# Altium footprint library WR-MPC3.PcbLib: 235 footprints (part 14 of 15)
Each footprint in its own frame and in the unit in brackets; x right, y up, seen from the top. Pads: shape width x height; smd on the part's side, far side on the other; paste and mask are expansions set on the pad; w line width, h text height; cw(c..) or ccw(c..) is an arc to the next point about the centre after c.
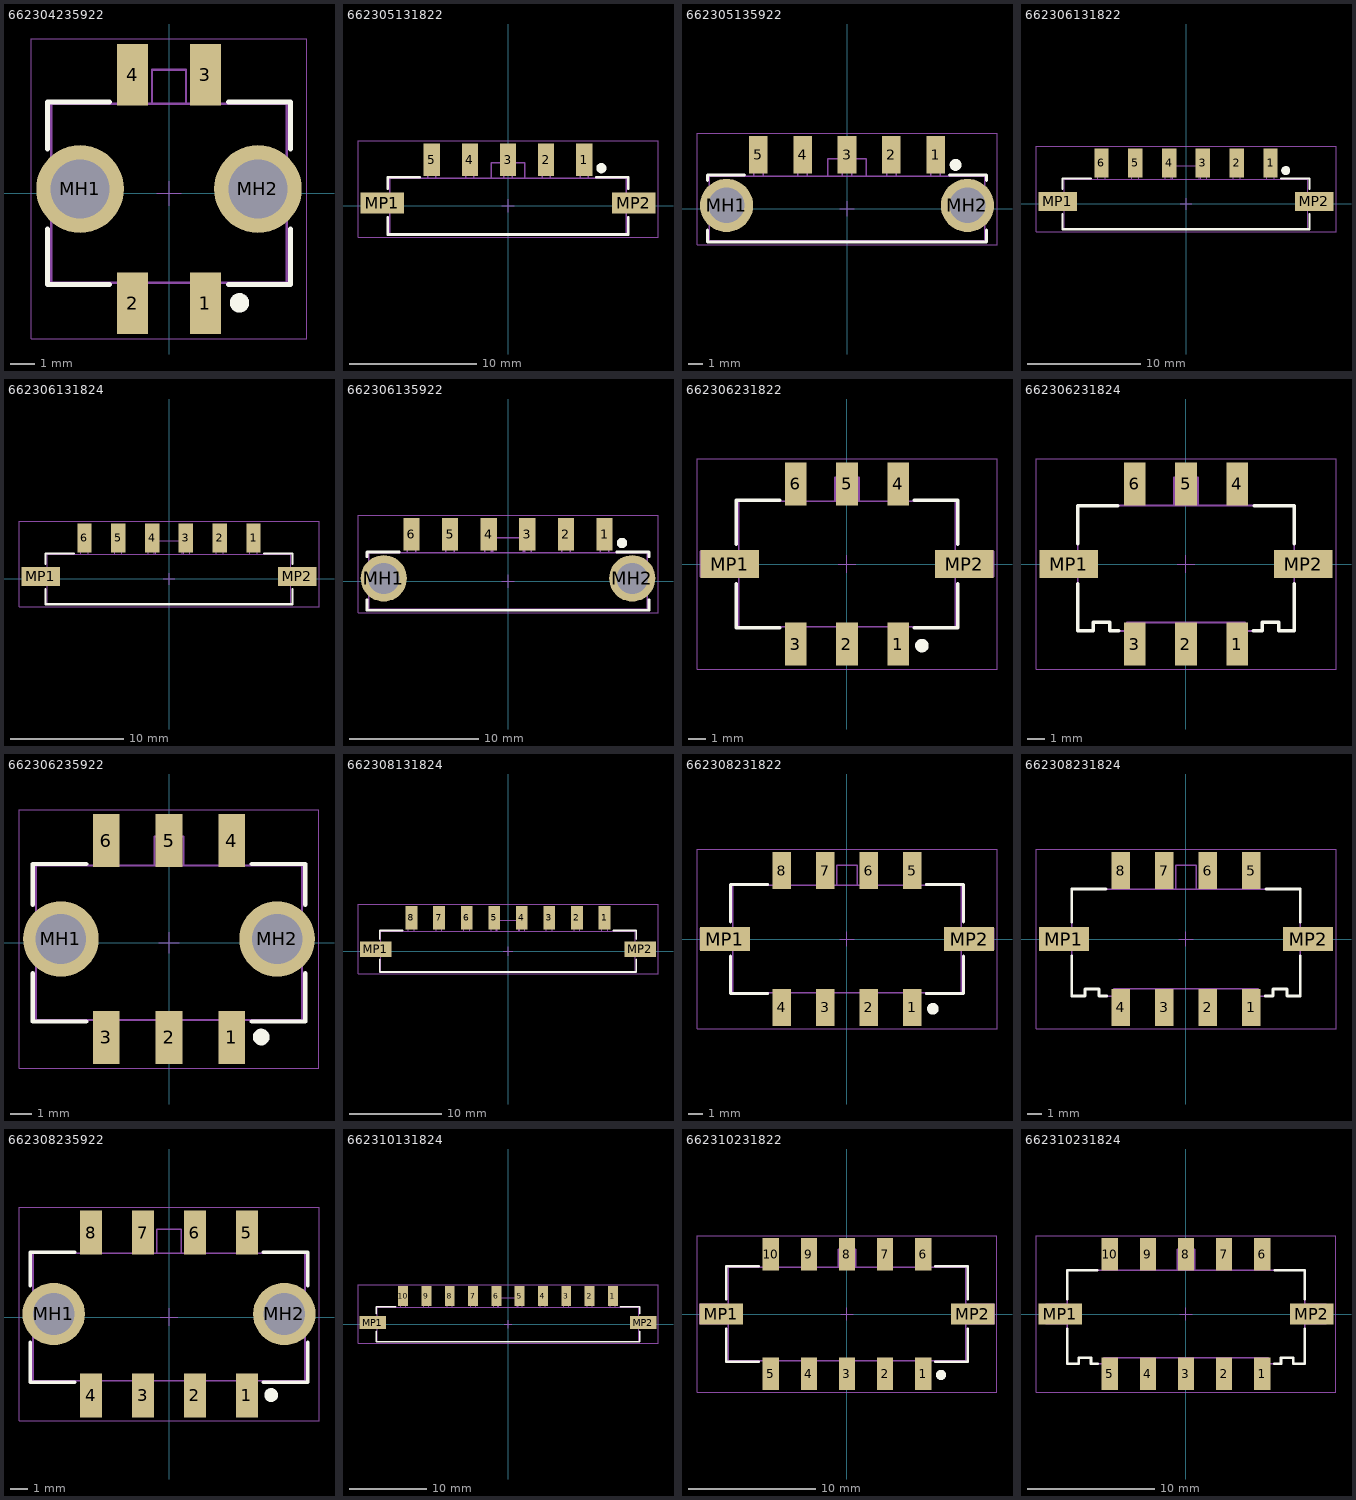
[diagram p13: the footprints below, top view; thin cyan lines are the x and y axes]

## 662304235922 [mm] "3.00mm SMT Male Dual Row Vertical Header with THT Retention Clip, 4p"
height 9.9
pads (6):
  rect 1.27x2.54 smd: 1(1.5,-4.52) 2(-1.5,-4.52) 3(1.5,4.88) 4(-1.5,4.88)
  round 3.6 hole 2.41: MH1(-3.66,0.18) MH2(3.66,0.18)
Top Overlay:
  circle w0.4: c2.9,-4.5 r0.2
  lines w0.2: -5,-1.455 -5,-3.755 -2.45,-3.755 ; -5,1.815 -5,3.755 -2.45,3.755 ; 2.45,-3.755 5,-3.755 5,-1.455 ; 2.45,3.755 5,3.755 5,1.815
Top Designator:
  text ".Designator" at -7.498,-0.5 h1.5
Top Component Outline:
  lines w0.1: -1.82,-3.68 -1.82,-5.45 -1.18,-5.45 -1.18,-3.68 ; -1.82,3.68 -1.82,5.95 -1.18,5.95 -1.18,3.68 ; -0.7,3.68 -0.7,5.08 0.7,5.08 0.7,3.68 ; 1.18,-3.68 1.18,-5.45 1.82,-5.45 1.82,-3.68 ; 1.18,3.68 1.18,5.95 1.82,5.95 1.82,3.68 ; -4.85,-3.68 4.85,-3.68 4.85,3.68 -4.85,3.68 -4.85,-3.68
Top 3D Body:
  lines w0.1: -1.82,-3.68 -1.82,-5.45 -1.18,-5.45 -1.18,-3.68 ; -1.82,3.68 -1.82,5.95 -1.18,5.95 -1.18,3.68 ; -0.7,3.68 -0.7,5.08 0.7,5.08 0.7,3.68 ; 1.18,-3.68 1.18,-5.45 1.82,-5.45 1.82,-3.68 ; 1.18,3.68 1.18,5.95 1.82,5.95 1.82,3.68 ; -4.85,-3.68 -4.85,3.68 4.85,3.68 4.85,-3.68 -4.85,-3.68
Top Courtyard:
  lines w0.05: -5.66,-5.99 5.66,-5.99 5.66,6.35 -5.66,6.35 -5.66,-5.99
Top Component Center:
  lines w0.05: -0.5,0 0.5,0 ; 0,-0.5 0,0.5
3D body "662304235922.stp": height 11.42, standoff -3.08, extent -4.85,-5.45 4.85,5.95

## 662305131822 [mm] "3.00mm SMT Male Single Vertical Header with SMT Solder Tab, 5p"
height 9.9
pads (7):
  rect 1.27x2.54 smd: 1(6,3.635) 2(3,3.635) 3(0,3.635) 4(-3,3.635) 5(-6,3.635)
  rect 3.43x1.65 smd: MP1(-9.895,0.215) MP2(9.895,0.215)
Top Overlay:
  circle w0.4: c7.35,2.96 r0.2
  lines w0.2: -9.45,-0.91 -9.45,-2.26 9.45,-2.26 9.45,-0.91 ; -9.45,1.34 -9.45,2.26 -6.95,2.26 ; 6.95,2.26 9.45,2.26 9.45,1.34
Top Designator:
  text ".Designator" at -7.498,-0.5 h1.5
Top Component Outline:
  lines w0.1: -9.325,-0.42 -11.325,-0.42 -11.325,0.85 -9.325,0.85 ; -6.32,2.185 -6.32,4.315 -5.68,4.315 -5.68,2.185 ; -3.32,2.185 -3.32,4.315 -2.68,4.315 -2.68,2.185 ; -1.3,2.185 -1.3,3.385 1.3,3.385 1.3,2.185 ; -0.32,2.185 -0.32,4.315 0.32,4.315 0.32,2.185 ; 2.68,2.185 2.68,4.315 3.32,4.315 3.32,2.185 ; 5.68,2.185 5.68,4.315 6.32,4.315 6.32,2.185 ; 9.325,-0.42 11.325,-0.42 11.325,0.85 9.325,0.85 ; -9.325,-2.185 9.325,-2.185 9.325,2.185 -9.325,2.185 -9.325,-2.185
Top 3D Body:
  lines w0.1: -9.325,-0.42 -11.325,-0.42 -11.325,0.85 -9.325,0.85 ; -6.32,2.185 -6.32,4.315 -5.68,4.315 -5.68,2.185 ; -3.32,2.185 -3.32,4.315 -2.68,4.315 -2.68,2.185 ; -1.3,2.185 -1.3,3.385 1.3,3.385 1.3,2.185 ; -0.32,2.185 -0.32,4.315 0.32,4.315 0.32,2.185 ; 2.68,2.185 2.68,4.315 3.32,4.315 3.32,2.185 ; 5.68,2.185 5.68,4.315 6.32,4.315 6.32,2.185 ; 9.325,-0.42 11.325,-0.42 11.325,0.85 9.325,0.85 ; -9.325,-2.185 9.325,-2.185 9.325,2.185 -9.325,2.185 -9.325,-2.185
Top Courtyard:
  lines w0.05: -11.81,-2.46 11.81,-2.46 11.81,5.105 -11.81,5.105 -11.81,-2.46
Top Component Center:
  lines w0.05: -0.5,0 0.5,0 ; 0,-0.5 0,0.5
3D body "662305131822.stp": height 10.14, standoff -0.01, extent -11.325,-2.25 11.325,4.315

## 662305135922 [mm] "3.00mm SMT Male Single Row Vertical Header with THT Retention Clip, 5p"
height 9.9
pads (7):
  rect 1.27x2.54 smd: 1(6,3.645) 2(3,3.645) 3(0,3.645) 4(-3,3.645) 5(-6,3.645)
  round 3.6 hole 2.41: MH1(-8.15,0.215) MH2(8.15,0.215)
Top Overlay:
  circle w0.4: c7.35,2.96 r0.2
  lines w0.2: -9.45,-1.46 -9.45,-2.26 9.45,-2.26 9.45,-1.46 ; -9.45,1.89 -9.45,2.26 -6.95,2.26 ; 6.95,2.26 9.45,2.26 9.45,1.89
Top Designator:
  text ".Designator" at -7.498,-0.5 h1.5
Top Component Outline:
  lines w0.1: -6.32,2.185 -6.32,4.445 -5.68,4.445 -5.68,2.185 ; -3.32,2.185 -3.32,4.445 -2.68,4.445 -2.68,2.185 ; -1.3,2.185 -1.3,3.385 1.3,3.385 1.3,2.185 ; -0.32,2.185 -0.32,4.445 0.32,4.445 0.32,2.185 ; 2.68,2.185 2.68,4.445 3.32,4.445 3.32,2.185 ; 5.68,2.185 5.68,4.445 6.32,4.445 6.32,2.185 ; -9.325,-2.185 9.325,-2.185 9.325,2.185 -9.325,2.185 -9.325,-2.185
Top 3D Body:
  lines w0.1: -6.32,2.185 -6.32,4.445 -5.68,4.445 -5.68,2.185 ; -3.32,2.185 -3.32,4.445 -2.68,4.445 -2.68,2.185 ; -1.3,2.185 -1.3,3.385 1.3,3.385 1.3,2.185 ; -0.32,2.185 -0.32,4.445 0.32,4.445 0.32,2.185 ; 2.68,2.185 2.68,4.445 3.32,4.445 3.32,2.185 ; 5.68,2.185 5.68,4.445 6.32,4.445 6.32,2.185 ; -9.325,-2.185 -9.325,2.185 9.325,2.185 9.325,-2.185 -9.325,-2.185
Top Courtyard:
  lines w0.05: -10.15,-2.46 -10.15,5.115 10.15,5.115 10.15,-2.46 -10.15,-2.46
Top Component Center:
  lines w0.05: -0.5,0 0.5,0 ; 0,-0.5 0,0.5
3D body "662305135922.stp": height 10.14, standoff -1.9, extent -9.325,-2.25 9.325,4.445

## 662306131822 [mm] "3.00mm SMT Male Single Vertical Header with SMT Solder Tab, 6p"
height 9.9
pads (8):
  rect 1.27x2.54 smd: 1(7.5,3.635) 2(4.5,3.635) 3(1.5,3.635) 4(-1.5,3.635) 5(-4.5,3.635) 6(-7.5,3.635)
  rect 3.43x1.65 smd: MP1(-11.395,0.215) MP2(11.395,0.215)
Top Overlay:
  circle w0.4: c8.85,2.96 r0.2
  lines w0.2: -10.95,-0.91 -10.95,-2.26 10.95,-2.26 10.95,-0.91 ; -10.95,1.34 -10.95,2.26 -8.45,2.26 ; 8.45,2.26 10.95,2.26 10.95,1.34
Top Designator:
  text ".Designator" at -7.498,-0.5 h1.5
Top Component Outline:
  lines w0.1: -10.825,-0.42 -12.825,-0.42 -12.825,0.85 -10.825,0.85 ; -7.82,2.185 -7.82,4.315 -7.18,4.315 -7.18,2.185 ; -4.82,2.185 -4.82,4.315 -4.18,4.315 -4.18,2.185 ; -1.82,2.185 -1.82,4.315 -1.18,4.315 -1.18,2.185 ; -1.3,2.185 -1.3,3.385 1.3,3.385 1.3,2.185 ; 1.18,2.185 1.18,4.315 1.82,4.315 1.82,2.185 ; 4.18,2.185 4.18,4.315 4.82,4.315 4.82,2.185 ; 7.18,2.185 7.18,4.315 7.82,4.315 7.82,2.185 ; 10.825,-0.42 12.825,-0.42 12.825,0.85 10.825,0.85 ; -10.825,-2.185 10.825,-2.185 10.825,2.185 -10.825,2.185 -10.825,-2.185
Top 3D Body:
  lines w0.1: -10.825,-0.42 -12.825,-0.42 -12.825,0.85 -10.825,0.85 ; -7.82,2.185 -7.82,4.315 -7.18,4.315 -7.18,2.185 ; -4.82,2.185 -4.82,4.315 -4.18,4.315 -4.18,2.185 ; -1.82,2.185 -1.82,4.315 -1.18,4.315 -1.18,2.185 ; -1.3,2.185 -1.3,3.385 1.3,3.385 1.3,2.185 ; 1.18,2.185 1.18,4.315 1.82,4.315 1.82,2.185 ; 4.18,2.185 4.18,4.315 4.82,4.315 4.82,2.185 ; 7.18,2.185 7.18,4.315 7.82,4.315 7.82,2.185 ; 10.825,-0.42 12.825,-0.42 12.825,0.85 10.825,0.85 ; -10.825,-2.185 -10.825,2.185 10.825,2.185 10.825,-2.185 -10.825,-2.185
Top Courtyard:
  lines w0.05: -13.31,-2.46 -13.31,5.105 13.31,5.105 13.31,-2.46 -13.31,-2.46
Top Component Center:
  lines w0.05: -0.5,0 0.5,0 ; 0,-0.5 0,0.5
3D body "662306131822.stp": height 10.14, standoff -0.01, extent -12.825,-2.25 12.825,4.315

## 662306131824 [mm] "3.00mm SMT Male Single Vertical Header with SMT Solder Tab, 6p"
height 9.9
pads (8):
  rect 1.27x2.54 smd: 1(7.5,3.635) 2(4.5,3.635) 3(1.5,3.635) 4(-1.5,3.635) 5(-4.5,3.635) 6(-7.5,3.635)
  rect 3.43x1.65 smd: MP1(-11.395,0.215) MP2(11.395,0.215)
Top Overlay:
  lines w0.2: -10.95,-0.91 -10.95,-2.26 10.95,-2.26 10.95,-0.91 ; -10.95,1.34 -10.95,2.26 -8.45,2.26 ; 8.45,2.26 10.95,2.26 10.95,1.34
Top Designator:
  text ".Designator" at -7.498,-0.5 h1.5
Top Component Outline:
  lines w0.1: -10.825,-0.42 -12.825,-0.42 -12.825,0.85 -10.825,0.85 ; -7.82,2.185 -7.82,4.315 -7.18,4.315 -7.18,2.185 ; -4.82,2.185 -4.82,4.315 -4.18,4.315 -4.18,2.185 ; -1.82,2.185 -1.82,4.315 -1.18,4.315 -1.18,2.185 ; -1.3,2.185 -1.3,3.385 1.3,3.385 1.3,2.185 ; 1.18,2.185 1.18,4.315 1.82,4.315 1.82,2.185 ; 4.18,2.185 4.18,4.315 4.82,4.315 4.82,2.185 ; 7.18,2.185 7.18,4.315 7.82,4.315 7.82,2.185 ; 10.825,-0.42 12.825,-0.42 12.825,0.85 10.825,0.85 ; -10.825,-2.185 -10.825,2.185 10.825,2.185 10.825,-2.185 -10.825,-2.185
Top Courtyard:
  lines w0.05: -13.31,-2.46 13.31,-2.46 13.31,5.105 -13.31,5.105 -13.31,-2.46
Top Component Center:
  lines w0.05: -0.5,0 0.5,0 ; 0,-0.5 0,0.5
3D body "662306131824.stp": height 10.14, standoff -0.01, extent -12.825,-2.249 12.825,4.315

## 662306135922 [mm] "3.00mm SMT Male Single Row Vertical Header with THT Retention Clip, 6p"
height 9.9
pads (8):
  rect 1.27x2.54 smd: 1(7.5,3.645) 2(4.5,3.645) 3(1.5,3.645) 4(-1.5,3.645) 5(-4.5,3.645) 6(-7.5,3.645)
  round 3.6 hole 2.41: MH1(-9.65,0.215) MH2(9.65,0.215)
Top Overlay:
  circle w0.4: c8.85,2.96 r0.2
  lines w0.2: -10.95,-1.46 -10.95,-2.26 10.95,-2.26 10.95,-1.46 ; -10.95,1.89 -10.95,2.26 -8.45,2.26 ; 8.45,2.26 10.95,2.26 10.95,1.89
Top Designator:
  text ".Designator" at -7.498,-0.5 h1.5
Top Component Outline:
  lines w0.1: -7.82,2.185 -7.82,4.445 -7.18,4.445 -7.18,2.185 ; -4.82,2.185 -4.82,4.445 -4.18,4.445 -4.18,2.185 ; -1.82,2.185 -1.82,4.445 -1.18,4.445 -1.18,2.185 ; -1.3,2.185 -1.3,3.385 1.3,3.385 1.3,2.185 ; 1.18,2.185 1.18,4.445 1.82,4.445 1.82,2.185 ; 4.18,2.185 4.18,4.445 4.82,4.445 4.82,2.185 ; 7.18,2.185 7.18,4.445 7.82,4.445 7.82,2.185 ; -10.825,-2.185 10.825,-2.185 10.825,2.185 -10.825,2.185 -10.825,-2.185
Top 3D Body:
  lines w0.1: -7.82,2.185 -7.82,4.445 -7.18,4.445 -7.18,2.185 ; -4.82,2.185 -4.82,4.445 -4.18,4.445 -4.18,2.185 ; -1.82,2.185 -1.82,4.445 -1.18,4.445 -1.18,2.185 ; -1.3,2.185 -1.3,3.385 1.3,3.385 1.3,2.185 ; 1.18,2.185 1.18,4.445 1.82,4.445 1.82,2.185 ; 4.18,2.185 4.18,4.445 4.82,4.445 4.82,2.185 ; 7.18,2.185 7.18,4.445 7.82,4.445 7.82,2.185 ; -10.825,-2.185 -10.825,2.185 10.825,2.185 10.825,-2.185 -10.825,-2.185
Top Courtyard:
  lines w0.05: -11.65,-2.46 -11.65,5.115 11.65,5.115 11.65,-2.46 -11.65,-2.46
Top Component Center:
  lines w0.05: -0.5,0 0.5,0 ; 0,-0.5 0,0.5
3D body "662306135922.stp": height 10.14, standoff -1.9, extent -10.825,-2.25 10.825,4.445

## 662306231822 [mm] "3.00mm SMT Male Dual Row Vertical Header with SMT Solder Tab, 6p"
height 9.9
pads (8):
  rect 1.27x2.54 smd: 1(3,-4.7) 2(0,-4.7) 3(-3,-4.7) 4(3,4.7) 5(0,4.7) 6(-3,4.7)
  rect 3.43x1.65 smd: MP1(-6.895,0) MP2(6.895,0)
Top Overlay:
  circle w0.4: c4.4,-4.795 r0.2
  lines w0.2: -6.5,-1.155 -6.5,-3.755 -3.95,-3.755 ; -6.5,1.155 -6.5,3.755 -3.95,3.755 ; 3.95,-3.755 6.5,-3.755 6.5,-1.155 ; 3.95,3.755 6.5,3.755 6.5,1.155
Top Designator:
  text ".Designator" at -7.498,-0.5 h1.5
Top Component Outline:
  lines w0.1: -6.35,-0.75 -8.6,-0.75 -8.6,0.75 -6.35,0.75 ; -3.32,-3.68 -3.32,-5.698 -2.68,-5.698 -2.68,-3.68 ; -3.32,3.68 -3.32,5.698 -2.68,5.698 -2.68,3.68 ; -0.7,3.68 -0.7,5.08 0.7,5.08 0.7,3.68 ; -0.32,-3.68 -0.32,-5.698 0.32,-5.698 0.32,-3.68 ; -0.32,3.68 -0.32,5.698 0.32,5.698 0.32,3.68 ; 2.68,-3.68 2.68,-5.698 3.32,-5.698 3.32,-3.68 ; 2.68,3.68 2.68,5.698 3.32,5.698 3.32,3.68 ; 6.35,-0.75 8.6,-0.75 8.6,0.75 6.35,0.75 ; -6.35,-3.68 6.35,-3.68 6.35,3.68 -6.35,3.68 ; -6.35,-3.68 -6.35,3.68 ; -6.35,-3.68 -6.35,3.68
Top 3D Body:
  lines w0.1: -6.35,-0.75 -8.6,-0.75 -8.6,0.75 -6.35,0.75 ; -3.32,-3.68 -3.32,-5.698 -2.68,-5.698 -2.68,-3.68 ; -3.32,3.68 -3.32,5.698 -2.68,5.698 -2.68,3.68 ; -0.7,3.68 -0.7,5.08 0.7,5.08 0.7,3.68 ; -0.32,-3.68 -0.32,-5.698 0.32,-5.698 0.32,-3.68 ; -0.32,3.68 -0.32,5.698 0.32,5.698 0.32,3.68 ; 2.68,-3.68 2.68,-5.698 3.32,-5.698 3.32,-3.68 ; 2.68,3.68 2.68,5.698 3.32,5.698 3.32,3.68 ; 6.35,-0.75 8.6,-0.75 8.6,0.75 6.35,0.75 ; -6.35,-3.68 -6.35,3.68 ; -6.35,-3.68 6.35,-3.68 6.35,3.68 -6.35,3.68 ; -6.35,-3.68 -6.35,3.68
Top Courtyard:
  lines w0.05: -8.81,-6.17 8.81,-6.17 8.81,6.17 -8.81,6.17 -8.81,-6.17
Top Component Center:
  lines w0.05: -0.5,0 0.5,0 ; 0,-0.5 0,0.5
3D body "662306231822.stp": height 11.43, standoff 0.03, extent -8.6,-5.698 8.6,5.698

## 662306231824 [mm] "3.00mm SMT Male Dual Row Vertical Header with SMT Solder Tab, 6p"
height 9.9
pads (8):
  rect 1.27x2.54 smd: 1(3,-4.7) 2(0,-4.7) 3(-3,-4.7) 4(3,4.7) 5(0,4.7) 6(-3,4.7)
  rect 3.43x1.65 smd: MP1(-6.895,0) MP2(6.895,0)
Top Overlay:
  lines w0.2: -6.35,-1.17 -6.35,-3.93 -5.45,-3.93 -5.45,-3.43 -4.48,-3.43 -4.48,-3.93 -3.95,-3.93 ; -6.35,1.18 -6.35,3.43 -4.003,3.43 ; 3.95,-3.93 4.48,-3.93 4.48,-3.43 5.45,-3.43 5.45,-3.93 6.35,-3.93 6.35,-1.17 ; 4.003,3.43 6.35,3.43 6.35,1.18
Top Designator:
  text ".Designator" at -7.498,-0.5 h1.5
Top Component Outline:
  lines w0.1: -6.35,-0.75 -8.05,-0.75 -8.05,0.75 -6.35,0.75 ; -3.32,-3.43 -3.32,-5.698 -2.68,-5.698 -2.68,-3.43 ; -3.32,3.43 -3.32,5.698 -2.68,5.698 -2.68,3.43 ; -0.7,3.43 -0.7,5.08 0.7,5.08 0.7,3.43 ; -0.32,-3.43 -0.32,-5.698 0.32,-5.698 0.32,-3.43 ; -0.32,3.43 -0.32,5.698 0.32,5.698 0.32,3.43 ; 2.68,-3.43 2.68,-5.698 3.32,-5.698 3.32,-3.43 ; 2.68,3.43 2.68,5.698 3.32,5.698 3.32,3.43 ; 6.35,-0.75 8.05,-0.75 8.05,0.75 6.35,0.75 ; -6.35,-3.93 -5.45,-3.93 -5.45,-3.43 -4.48,-3.43 -4.48,-3.93 -3.48,-3.93 -3.48,-3.43 3.48,-3.43 3.48,-3.93 4.48,-3.93 4.48,-3.43 5.45,-3.43 5.45,-3.93 6.35,-3.93 6.35,3.43 -6.35,3.43 -6.35,-3.93
Top Courtyard:
  lines w0.05: -8.81,-6.17 -8.81,6.17 8.81,6.17 8.81,-6.17 -8.81,-6.17
Top Component Center:
  lines w0.05: -0.5,0 0.5,0 ; 0,-0.5 0,0.5
3D body "662306231824.stp": height 11.43, standoff 0.03, extent -8.045,-5.698 8.045,5.698

## 662306235922 [mm] "3.00mm SMT Male Dual Row Vertical Header with THT Retention Clip, 6p"
height 9.9
pads (8):
  rect 1.27x2.54 smd: 1(3,-4.52) 2(0,-4.52) 3(-3,-4.52) 4(3,4.88) 5(0,4.88) 6(-3,4.88)
  round 3.6 hole 2.41: MH1(-5.16,0.18) MH2(5.16,0.18)
Top Overlay:
  circle w0.4: c4.4,-4.5 r0.2
  lines w0.2: -6.5,-1.455 -6.5,-3.755 -3.95,-3.755 ; -6.5,1.815 -6.5,3.755 -3.95,3.755 ; 3.95,-3.755 6.5,-3.755 6.5,-1.455 ; 3.95,3.755 6.5,3.755 6.5,1.815
Top Designator:
  text ".Designator" at -7.498,-0.5 h1.5
Top Component Outline:
  lines w0.1: -3.32,-3.68 -3.32,-5.45 -2.68,-5.45 -2.68,-3.68 ; -3.32,3.68 -3.32,5.95 -2.68,5.95 -2.68,3.68 ; -0.7,3.68 -0.7,5.08 0.7,5.08 0.7,3.68 ; -0.32,-3.68 -0.32,-5.45 0.32,-5.45 0.32,-3.68 ; -0.32,3.68 -0.32,5.95 0.32,5.95 0.32,3.68 ; 2.68,-3.68 2.68,-5.45 3.32,-5.45 3.32,-3.68 ; 2.68,3.68 2.68,5.95 3.32,5.95 3.32,3.68 ; -6.35,-3.68 -6.35,3.68 6.35,3.68 6.35,-3.68 -6.35,-3.68
Top 3D Body:
  lines w0.1: -3.32,-3.68 -3.32,-5.45 -2.68,-5.45 -2.68,-3.68 ; -3.32,3.68 -3.32,5.95 -2.68,5.95 -2.68,3.68 ; -0.7,3.68 -0.7,5.08 0.7,5.08 0.7,3.68 ; -0.32,-3.68 -0.32,-5.45 0.32,-5.45 0.32,-3.68 ; -0.32,3.68 -0.32,5.95 0.32,5.95 0.32,3.68 ; 2.68,-3.68 2.68,-5.45 3.32,-5.45 3.32,-3.68 ; 2.68,3.68 2.68,5.95 3.32,5.95 3.32,3.68 ; -6.35,-3.68 6.35,-3.68 6.35,3.68 -6.35,3.68 -6.35,-3.68
Top Courtyard:
  lines w0.05: -7.16,-5.99 -7.16,6.35 7.16,6.35 7.16,-5.99 -7.16,-5.99
Top Component Center:
  lines w0.05: -0.5,0 0.5,0 ; 0,-0.5 0,0.5
3D body "662306235922.stp": height 11.42, standoff -3.08, extent -6.35,-5.45 6.35,5.95

## 662308131824 [mm] "3.00mm SMT Male Single Vertical Header with SMT Solder Tab, 8p"
height 9.9
pads (10):
  rect 1.27x2.54 smd: 1(10.5,3.635) 2(7.5,3.635) 3(4.5,3.635) 4(1.5,3.635) 5(-1.5,3.635) 6(-4.5,3.635) 7(-7.5,3.635) 8(-10.5,3.635)
  rect 3.43x1.65 smd: MP1(-14.395,0.215) MP2(14.395,0.215)
Top Overlay:
  lines w0.2: -13.95,-0.91 -13.95,-2.26 13.95,-2.26 13.95,-0.91 ; -13.95,1.34 -13.95,2.26 -11.45,2.26 ; 11.45,2.26 13.95,2.26 13.95,1.34
Top Designator:
  text ".Designator" at -7.498,-0.5 h1.5
Top Component Outline:
  lines w0.1: -13.825,-0.42 -15.825,-0.42 -15.825,0.85 -13.825,0.85 ; -10.82,2.185 -10.82,4.315 -10.18,4.315 -10.18,2.185 ; -7.82,2.185 -7.82,4.315 -7.18,4.315 -7.18,2.185 ; -4.82,2.185 -4.82,4.315 -4.18,4.315 -4.18,2.185 ; -1.82,2.185 -1.82,4.315 -1.18,4.315 -1.18,2.185 ; -1.3,2.185 -1.3,3.385 1.3,3.385 1.3,2.185 ; 1.18,2.185 1.18,4.315 1.82,4.315 1.82,2.185 ; 4.18,2.185 4.18,4.315 4.82,4.315 4.82,2.185 ; 7.18,2.185 7.18,4.315 7.82,4.315 7.82,2.185 ; 10.18,2.185 10.18,4.315 10.82,4.315 10.82,2.185 ; 13.825,-0.42 15.825,-0.42 15.825,0.85 13.825,0.85 ; -13.825,-2.185 13.825,-2.185 13.825,2.185 -13.825,2.185 -13.825,-2.185
Top Courtyard:
  lines w0.05: -16.31,-2.46 -16.31,5.105 16.31,5.105 16.31,-2.46 -16.31,-2.46
Top Component Center:
  lines w0.05: -0.5,0 0.5,0 ; 0,-0.5 0,0.5
3D body "662308131824.stp": height 10.14, standoff -0.01, extent -15.825,-2.185 15.825,4.379

## 662308231822 [mm] "3.00mm SMT Male Dual Row Vertical Header with SMT Solder Tab, 8p"
height 9.9
pads (10):
  rect 1.27x2.54 smd: 1(4.5,-4.7) 2(1.5,-4.7) 3(-1.5,-4.7) 4(-4.5,-4.7) 5(4.5,4.7) 6(1.5,4.7) 7(-1.5,4.7) 8(-4.5,4.7)
  rect 3.43x1.65 smd: MP1(-8.395,0) MP2(8.395,0)
Top Overlay:
  circle w0.4: c5.9,-4.795 r0.2
  lines w0.2: -8,-1.155 -8,-3.755 -5.45,-3.755 ; -8,1.155 -8,3.755 -5.45,3.755 ; 5.45,-3.755 8,-3.755 8,-1.155 ; 5.45,3.755 8,3.755 8,1.155
Top Designator:
  text ".Designator" at -7.498,-0.5 h1.5
Top Component Outline:
  lines w0.1: -7.85,-0.75 -10.1,-0.75 -10.1,0.75 -7.85,0.75 ; -4.82,-3.68 -4.82,-5.698 -4.18,-5.698 -4.18,-3.68 ; -4.82,3.68 -4.82,5.698 -4.18,5.698 -4.18,3.68 ; -1.82,-3.68 -1.82,-5.698 -1.18,-5.698 -1.18,-3.68 ; -1.82,3.68 -1.82,5.698 -1.18,5.698 -1.18,3.68 ; -0.7,3.68 -0.7,5.08 0.7,5.08 0.7,3.68 ; 1.18,-3.68 1.18,-5.698 1.82,-5.698 1.82,-3.68 ; 1.18,3.68 1.18,5.698 1.82,5.698 1.82,3.68 ; 4.18,-3.68 4.18,-5.698 4.82,-5.698 4.82,-3.68 ; 4.18,3.68 4.18,5.698 4.82,5.698 4.82,3.68 ; 7.85,-0.75 10.1,-0.75 10.1,0.75 7.85,0.75 ; -7.85,-3.68 7.85,-3.68 7.85,3.68 -7.85,3.68 -7.85,-3.68
Top 3D Body:
  lines w0.1: -7.85,-0.75 -10.1,-0.75 -10.1,0.75 -7.85,0.75 ; -4.82,-3.68 -4.82,-5.698 -4.18,-5.698 -4.18,-3.68 ; -4.82,3.68 -4.82,5.698 -4.18,5.698 -4.18,3.68 ; -1.82,-3.68 -1.82,-5.698 -1.18,-5.698 -1.18,-3.68 ; -1.82,3.68 -1.82,5.698 -1.18,5.698 -1.18,3.68 ; -0.7,3.68 -0.7,5.08 0.7,5.08 0.7,3.68 ; 1.18,-3.68 1.18,-5.698 1.82,-5.698 1.82,-3.68 ; 1.18,3.68 1.18,5.698 1.82,5.698 1.82,3.68 ; 4.18,-3.68 4.18,-5.698 4.82,-5.698 4.82,-3.68 ; 4.18,3.68 4.18,5.698 4.82,5.698 4.82,3.68 ; 7.85,-0.75 10.1,-0.75 10.1,0.75 7.85,0.75 ; -7.85,-3.68 -7.85,3.68 7.85,3.68 7.85,-3.68 -7.85,-3.68
Top Courtyard:
  lines w0.05: -10.31,-6.17 -10.31,6.17 10.31,6.17 10.31,-6.17 -10.31,-6.17
Top Component Center:
  lines w0.05: -0.5,0 0.5,0 ; 0,-0.5 0,0.5
3D body "662308231822.stp": height 11.43, standoff 0.03, extent -10.1,-5.698 10.1,5.698

## 662308231824 [mm] "3.00mm SMT Male Dual Row Vertical Header with SMT Solder Tab, 8p"
height 9.9
pads (10):
  rect 1.27x2.54 smd: 1(4.5,-4.7) 2(1.5,-4.7) 3(-1.5,-4.7) 4(-4.5,-4.7) 5(4.5,4.7) 6(1.5,4.7) 7(-1.5,4.7) 8(-4.5,4.7)
  rect 3.43x1.65 smd: MP1(-8.395,0) MP2(8.395,0)
Top Overlay:
  lines w0.2: -7.85,-1.17 -7.85,-3.93 -6.95,-3.93 -6.95,-3.43 -5.98,-3.43 -5.98,-3.93 -5.45,-3.93 ; -7.85,1.18 -7.85,3.43 -5.503,3.43 ; 5.45,-3.93 5.98,-3.93 5.98,-3.43 6.95,-3.43 6.95,-3.93 7.85,-3.93 7.85,-1.17 ; 5.503,3.43 7.85,3.43 7.85,1.18
Top Designator:
  text ".Designator" at -7.498,-0.5 h1.5
Top Component Outline:
  lines w0.1: -7.85,-0.75 -9.55,-0.75 -9.55,0.75 -7.85,0.75 ; -4.82,-3.43 -4.82,-5.698 -4.18,-5.698 -4.18,-3.43 ; -4.82,3.43 -4.82,5.698 -4.18,5.698 -4.18,3.43 ; -1.82,-3.43 -1.82,-5.698 -1.18,-5.698 -1.18,-3.43 ; -1.82,3.43 -1.82,5.698 -1.18,5.698 -1.18,3.43 ; -0.7,3.43 -0.7,5.08 0.7,5.08 0.7,3.43 ; 1.18,-3.43 1.18,-5.698 1.82,-5.698 1.82,-3.43 ; 1.18,3.43 1.18,5.698 1.82,5.698 1.82,3.43 ; 4.18,-3.43 4.18,-5.698 4.82,-5.698 4.82,-3.43 ; 4.18,3.43 4.18,5.698 4.82,5.698 4.82,3.43 ; 7.85,-0.75 9.55,-0.75 9.55,0.75 7.85,0.75 ; -7.85,-3.93 -6.95,-3.93 -6.95,-3.43 -5.98,-3.43 -5.98,-3.93 -4.98,-3.93 -4.98,-3.43 4.98,-3.43 4.98,-3.93 5.98,-3.93 5.98,-3.43 6.95,-3.43 6.95,-3.93 7.85,-3.93 7.85,3.43 -7.85,3.43 -7.85,-3.93
Top Courtyard:
  lines w0.05: -10.31,-6.17 -10.31,6.17 10.31,6.17 10.31,-6.17 -10.31,-6.17
Top Component Center:
  lines w0.05: -0.5,0 0.5,0 ; 0,-0.5 0,0.5
3D body "662308231824.stp": height 11.43, standoff 0.03, extent -9.545,-5.698 9.545,5.698

## 662308235922 [mm] "3.00mm SMT Male Dual Row Vertical Header with THT Retention Clip, 8p"
height 9.9
pads (10):
  rect 1.27x2.54 smd: 1(4.5,-4.52) 2(1.5,-4.52) 3(-1.5,-4.52) 4(-4.5,-4.52) 5(4.5,4.88) 6(1.5,4.88) 7(-1.5,4.88) 8(-4.5,4.88)
  round 3.6 hole 2.41: MH1(-6.66,0.18) MH2(6.66,0.18)
Top Overlay:
  circle w0.4: c5.9,-4.5 r0.2
  lines w0.2: -8,-1.455 -8,-3.755 -5.45,-3.755 ; -8,1.815 -8,3.755 -5.45,3.755 ; 5.45,-3.755 8,-3.755 8,-1.455 ; 5.45,3.755 8,3.755 8,1.815
Top Designator:
  text ".Designator" at -7.498,-0.5 h1.5
Top Component Outline:
  lines w0.1: -4.82,-3.68 -4.82,-5.45 -4.18,-5.45 -4.18,-3.68 ; -4.82,3.68 -4.82,5.95 -4.18,5.95 -4.18,3.68 ; -1.82,-3.68 -1.82,-5.45 -1.18,-5.45 -1.18,-3.68 ; -1.82,3.68 -1.82,5.95 -1.18,5.95 -1.18,3.68 ; -0.7,3.68 -0.7,5.08 0.7,5.08 0.7,3.68 ; 1.18,-3.68 1.18,-5.45 1.82,-5.45 1.82,-3.68 ; 1.18,3.68 1.18,5.95 1.82,5.95 1.82,3.68 ; 4.18,-3.68 4.18,-5.45 4.82,-5.45 4.82,-3.68 ; 4.18,3.68 4.18,5.95 4.82,5.95 4.82,3.68 ; -7.85,-3.68 7.85,-3.68 7.85,3.68 -7.85,3.68 -7.85,-3.68
Top 3D Body:
  lines w0.1: -4.82,-3.68 -4.82,-5.45 -4.18,-5.45 -4.18,-3.68 ; -4.82,3.68 -4.82,5.95 -4.18,5.95 -4.18,3.68 ; -1.82,-3.68 -1.82,-5.45 -1.18,-5.45 -1.18,-3.68 ; -1.82,3.68 -1.82,5.95 -1.18,5.95 -1.18,3.68 ; -0.7,3.68 -0.7,5.08 0.7,5.08 0.7,3.68 ; 1.18,-3.68 1.18,-5.45 1.82,-5.45 1.82,-3.68 ; 1.18,3.68 1.18,5.95 1.82,5.95 1.82,3.68 ; 4.18,-3.68 4.18,-5.45 4.82,-5.45 4.82,-3.68 ; 4.18,3.68 4.18,5.95 4.82,5.95 4.82,3.68 ; -7.85,-3.68 7.85,-3.68 7.85,3.68 -7.85,3.68 -7.85,-3.68
Top Courtyard:
  lines w0.05: -8.66,-5.99 -8.66,6.35 8.66,6.35 8.66,-5.99 -8.66,-5.99
Top Component Center:
  lines w0.05: -0.5,0 0.5,0 ; 0,-0.5 0,0.5
3D body "662308235922.stp": height 11.42, standoff -3.08, extent -7.85,-5.45 7.85,5.95

## 662310131824 [mm] "3.00mm SMT Male Single Vertical Header with SMT Solder Tab, 10p"
height 9.9
pads (12):
  rect 1.27x2.54 smd: 1(13.5,3.635) 2(10.5,3.635) 3(7.5,3.635) 4(4.5,3.635) 5(1.5,3.635) 6(-1.5,3.635) 7(-4.5,3.635) 8(-7.5,3.635) 9(-10.5,3.635) 10(-13.5,3.635)
  rect 3.43x1.65 smd: MP1(-17.395,0.215) MP2(17.395,0.215)
Top Overlay:
  lines w0.2: -16.95,-0.91 -16.95,-2.26 16.95,-2.26 16.95,-0.91 ; -16.95,1.34 -16.95,2.26 -14.45,2.26 ; 14.45,2.26 16.95,2.26 16.95,1.34
Top Designator:
  text ".Designator" at -7.498,-0.5 h1.5
Top Component Outline:
  lines w0.1: -16.825,-0.42 -18.825,-0.42 -18.825,0.85 -16.825,0.85 ; -13.82,2.185 -13.82,4.315 -13.18,4.315 -13.18,2.185 ; -10.82,2.185 -10.82,4.315 -10.18,4.315 -10.18,2.185 ; -7.82,2.185 -7.82,4.315 -7.18,4.315 -7.18,2.185 ; -4.82,2.185 -4.82,4.315 -4.18,4.315 -4.18,2.185 ; -1.82,2.185 -1.82,4.315 -1.18,4.315 -1.18,2.185 ; -1.3,2.185 -1.3,3.385 1.3,3.385 1.3,2.185 ; 1.18,2.185 1.18,4.315 1.82,4.315 1.82,2.185 ; 4.18,2.185 4.18,4.315 4.82,4.315 4.82,2.185 ; 7.18,2.185 7.18,4.315 7.82,4.315 7.82,2.185 ; 10.18,2.185 10.18,4.315 10.82,4.315 10.82,2.185 ; 13.18,2.185 13.18,4.315 13.82,4.315 13.82,2.185 ; 16.825,-0.42 18.825,-0.42 18.825,0.85 16.825,0.85 ; -16.825,-2.185 16.825,-2.185 16.825,2.185 -16.825,2.185 -16.825,-2.185
Top Courtyard:
  lines w0.05: -19.31,-2.46 -19.31,5.105 19.31,5.105 19.31,-2.46 -19.31,-2.46
Top Component Center:
  lines w0.05: -0.5,0 0.5,0 ; 0,-0.5 0,0.5
3D body "662310131824.stp": height 10.14, standoff -0.01, extent -18.825,-2.185 18.825,4.379

## 662310231822 [mm] "3.00mm SMT Male Dual Row Vertical Header with SMT Solder Tab, 10p"
height 9.9
pads (12):
  rect 1.27x2.54 smd: 1(6,-4.7) 2(3,-4.7) 3(0,-4.7) 4(-3,-4.7) 5(-6,-4.7) 6(6,4.7) 7(3,4.7) 8(0,4.7) 9(-3,4.7) 10(-6,4.7)
  rect 3.43x1.65 smd: MP1(-9.895,0) MP2(9.895,0)
Top Overlay:
  circle w0.4: c7.4,-4.795 r0.2
  lines w0.2: -9.5,-1.155 -9.5,-3.755 -6.95,-3.755 ; -9.5,1.155 -9.5,3.755 -6.95,3.755 ; 6.95,-3.755 9.5,-3.755 9.5,-1.155 ; 6.95,3.755 9.5,3.755 9.5,1.155
Top Designator:
  text ".Designator" at -7.498,-0.5 h1.5
Top Component Outline:
  lines w0.1: -9.35,-0.75 -11.6,-0.75 -11.6,0.75 -9.35,0.75 ; -6.32,-3.68 -6.32,-5.698 -5.68,-5.698 -5.68,-3.68 ; -6.32,3.68 -6.32,5.698 -5.68,5.698 -5.68,3.68 ; -3.32,-3.68 -3.32,-5.698 -2.68,-5.698 -2.68,-3.68 ; -3.32,3.68 -3.32,5.698 -2.68,5.698 -2.68,3.68 ; -0.7,3.68 -0.7,5.08 0.7,5.08 0.7,3.68 ; -0.32,-3.68 -0.32,-5.698 0.32,-5.698 0.32,-3.68 ; -0.32,3.68 -0.32,5.698 0.32,5.698 0.32,3.68 ; 2.68,-3.68 2.68,-5.698 3.32,-5.698 3.32,-3.68 ; 2.68,3.68 2.68,5.698 3.32,5.698 3.32,3.68 ; 5.68,-3.68 5.68,-5.698 6.32,-5.698 6.32,-3.68 ; 5.68,3.68 5.68,5.698 6.32,5.698 6.32,3.68 ; 9.35,-0.75 11.6,-0.75 11.6,0.75 9.35,0.75 ; -9.35,-3.68 9.35,-3.68 9.35,3.68 -9.35,3.68 -9.35,-3.68
Top 3D Body:
  lines w0.1: -9.35,-0.75 -11.6,-0.75 -11.6,0.75 -9.35,0.75 ; -6.32,-3.68 -6.32,-5.698 -5.68,-5.698 -5.68,-3.68 ; -6.32,3.68 -6.32,5.698 -5.68,5.698 -5.68,3.68 ; -3.32,-3.68 -3.32,-5.698 -2.68,-5.698 -2.68,-3.68 ; -3.32,3.68 -3.32,5.698 -2.68,5.698 -2.68,3.68 ; -0.7,3.68 -0.7,5.08 0.7,5.08 0.7,3.68 ; -0.32,-3.68 -0.32,-5.698 0.32,-5.698 0.32,-3.68 ; -0.32,3.68 -0.32,5.698 0.32,5.698 0.32,3.68 ; 2.68,-3.68 2.68,-5.698 3.32,-5.698 3.32,-3.68 ; 2.68,3.68 2.68,5.698 3.32,5.698 3.32,3.68 ; 5.68,-3.68 5.68,-5.698 6.32,-5.698 6.32,-3.68 ; 5.68,3.68 5.68,5.698 6.32,5.698 6.32,3.68 ; 9.35,-0.75 11.6,-0.75 11.6,0.75 9.35,0.75 ; -9.35,-3.68 -9.35,3.68 9.35,3.68 9.35,-3.68 -9.35,-3.68
Top Courtyard:
  lines w0.05: -11.81,-6.17 -11.81,6.17 11.81,6.17 11.81,-6.17 -11.81,-6.17
Top Component Center:
  lines w0.05: -0.5,0 0.5,0 ; 0,-0.5 0,0.5
3D body "662310231822.stp": height 11.43, standoff 0.03, extent -11.6,-5.698 11.6,5.698

## 662310231824 [mm] "3.00mm SMT Male Dual Row Vertical Header with SMT Solder Tab, 10p"
height 9.9
pads (12):
  rect 1.27x2.54 smd: 1(6,-4.7) 2(3,-4.7) 3(0,-4.7) 4(-3,-4.7) 5(-6,-4.7) 6(6,4.7) 7(3,4.7) 8(0,4.7) 9(-3,4.7) 10(-6,4.7)
  rect 3.43x1.65 smd: MP1(-9.895,0) MP2(9.895,0)
Top Overlay:
  lines w0.2: -9.35,-1.17 -9.35,-3.93 -8.45,-3.93 -8.45,-3.43 -7.48,-3.43 -7.48,-3.93 -6.95,-3.93 ; -9.35,1.18 -9.35,3.43 -7.003,3.43 ; 6.95,-3.93 7.48,-3.93 7.48,-3.43 8.45,-3.43 8.45,-3.93 9.35,-3.93 9.35,-1.17 ; 7.003,3.43 9.35,3.43 9.35,1.18
Top Designator:
  text ".Designator" at -7.498,-0.5 h1.5
Top Component Outline:
  lines w0.1: -9.35,-0.75 -11.05,-0.75 -11.05,0.75 -9.35,0.75 ; -6.32,-3.43 -6.32,-5.698 -5.68,-5.698 -5.68,-3.43 ; -6.32,3.43 -6.32,5.698 -5.68,5.698 -5.68,3.43 ; -3.32,-3.43 -3.32,-5.698 -2.68,-5.698 -2.68,-3.43 ; -3.32,3.43 -3.32,5.698 -2.68,5.698 -2.68,3.43 ; -0.7,3.43 -0.7,5.08 0.7,5.08 0.7,3.43 ; -0.32,-3.43 -0.32,-5.698 0.32,-5.698 0.32,-3.43 ; -0.32,3.43 -0.32,5.698 0.32,5.698 0.32,3.43 ; 2.68,-3.43 2.68,-5.698 3.32,-5.698 3.32,-3.43 ; 2.68,3.43 2.68,5.698 3.32,5.698 3.32,3.43 ; 5.68,-3.43 5.68,-5.698 6.32,-5.698 6.32,-3.43 ; 5.68,3.43 5.68,5.698 6.32,5.698 6.32,3.43 ; 9.35,-0.75 11.05,-0.75 11.05,0.75 9.35,0.75 ; -9.35,-3.93 -9.35,3.43 9.35,3.43 9.35,-3.93 8.45,-3.93 8.45,-3.43 7.48,-3.43 7.48,-3.93 6.48,-3.93 6.48,-3.43 -6.48,-3.43 -6.48,-3.93 -7.48,-3.93 -7.48,-3.43 -8.45,-3.43 -8.45,-3.93 -9.35,-3.93
Top Courtyard:
  lines w0.05: -11.81,-6.17 11.81,-6.17 11.81,6.17 -11.81,6.17 -11.81,-6.17
Top Component Center:
  lines w0.05: -0.5,0 0.5,0 ; 0,-0.5 0,0.5
3D body "662310231824.stp": height 11.43, standoff 0.03, extent -11.045,-5.698 11.045,5.698